# Altium footprint library VJ0402D100KXCAP.PcbLib: 1 footprints
Each footprint in its own frame and in the unit in brackets; x right, y up, seen from the top. Pads: shape width x height; smd on the part's side, far side on the other; paste and mask are expansions set on the pad; w line width, h text height; cw(c..) or ccw(c..) is an arc to the next point about the centre after c.
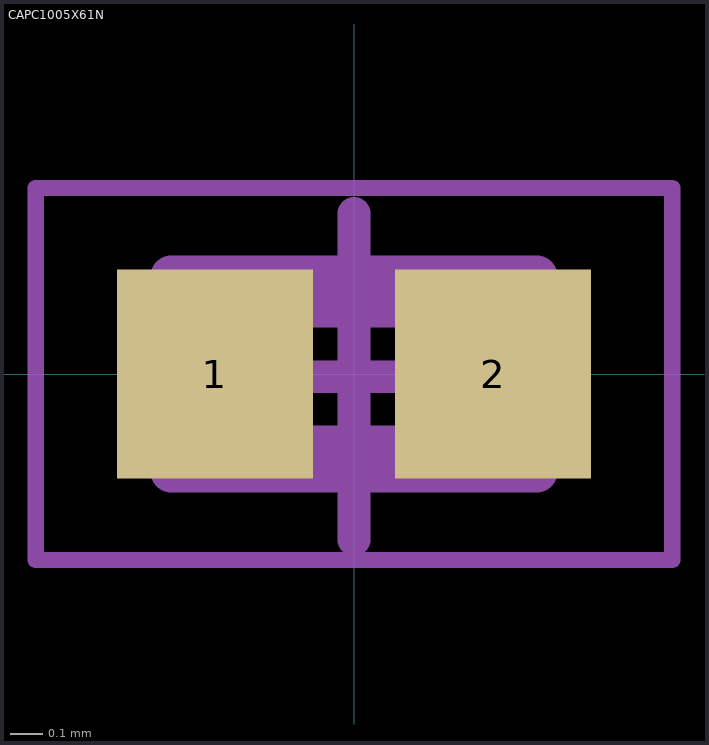
[diagram p0: the footprint, top view; thin cyan lines are the x and y axes]

## CAPC1005X61N [mm]
pads (2):
  rect 0.6x0.64 smd: 1(-0.426,0) 2(0.426,0)
Top 3D Body:
  lines w0.2: -0.5,-0.258 -0.5,0.242 0.5,0.242 0.5,-0.258 -0.5,-0.258
Mechanical 13:
  lines w0.127: -0.56,-0.3 -0.56,0.3 0.56,0.3 0.56,-0.3 -0.56,-0.3
Mechanical 15:
  lines w0.05: -0.975,-0.57 -0.975,0.57 0.975,0.57 0.975,-0.57 -0.975,-0.57
Top Component Center:
  lines w0.1: -0.5,-0.008 0.5,-0.008 ; 0,-0.508 0,0.492
3D body "Cap_AVX_04025C472KAT2A_eec.STEP": height 0.25, standoff 0, extent -1.056,-0.564 1.056,0.548